# EAGLE library part STCC4-D-R3 (library card_samac_3d)
Air Quality Sensors STCC4-D-R3 CO2 I2C, SMD ToR 1500 pcs 2.7V ~ 5.5V 950A 10C ~ 40C Source: Datasheet <https://sensirion.com/media/documents/6AED4B15/684A889C/CD_DS_STCC4_D1_3.pdf>
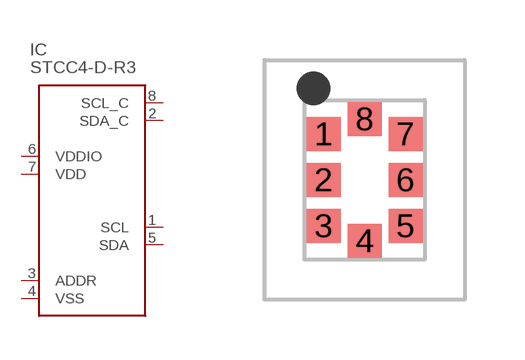
[diagram p4: symbol with the pads of STCC4DR3; footprint STCC4DR3]

Designator prefix IC

## STCC4-D-R3  [STCC4DR3]
1  SCL
2  SDA_C
3  ADDR
4  VSS
5  SDA
6  VDDIO
7  VDD
8  SCL_C

## Footprint STCC4DR3 (pad centres in mm)
8-LGA
smd 0.85 x 0.85: 1 -1.025,1.15; 2 -1.025,0; 3 -1.025,-1.15; 4 0,-1.525; 5 1.025,-1.15; 6 1.025,0; 7 1.025,1.15; 8 0,1.525